# EAGLE library part OBD2-J1962 (library moto-core)
OBD2-J1962 SAE J1962 16-pin OBD2 konnektor (Honda DLC adaptor ucu / HIL dişi soket). Pin numaralari standart. Kart: 40.0 x 18.0 mm - Guven: H STEP: GrabCAD 'OBD2 J1962 female connector' NOT: CL250 DLC (4/6-pin) pinout'u hardware-integration §1'de CONFIRM; bu cihaz adaptorun 16-pin ucu.
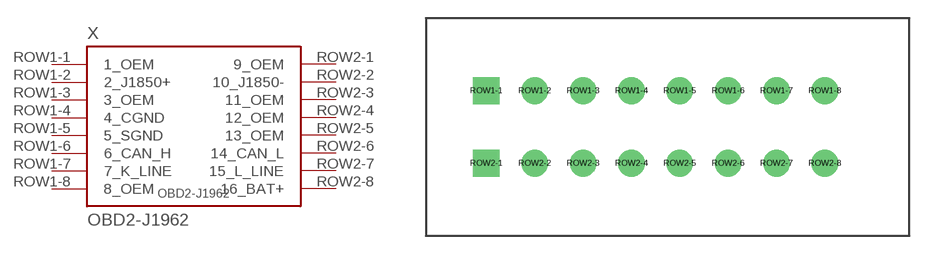
[diagram p6: symbol with the pads of OBD2-J1962; footprint OBD2-J1962]

Designator prefix X

## OBD2-J1962 (BOARD_SIZE: 40.0x18.0mm; CONFIDENCE: H)  [OBD2-J1962]
ROW1-1  1_OEM  pas
ROW1-2  2_J1850+  pas
ROW1-3  3_OEM  pas
ROW1-4  4_CGND  pas
ROW1-5  5_SGND  pas
ROW1-6  6_CAN_H  pas
ROW1-7  7_K_LINE  pas
ROW1-8  8_OEM  pas
ROW2-1  9_OEM  pas
ROW2-2  10_J1850-  pas
ROW2-3  11_OEM  pas
ROW2-4  12_OEM  pas
ROW2-5  13_OEM  pas
ROW2-6  14_CAN_L  pas
ROW2-7  15_L_LINE  pas
ROW2-8  16_BAT+  pas

## Footprint OBD2-J1962 (pad centres in mm)
SAE J1962 16-pin OBD2 konnektor (Honda DLC adaptor ucu / HIL dişi soket). Pin numaralari standart. | Kart: 40.0 x 18.0 mm | Guven: H
drill 1.2 pad 2.2 square: ROW1-1 -15,3; ROW2-1 -15,-3
drill 1.2 pad 2.2 round: ROW1-2 -11,3; ROW1-3 -7,3; ROW1-4 -3,3; ROW1-5 1,3; ROW1-6 5,3; ROW1-7 9,3; ROW1-8 13,3; ROW2-2 -11,-3; ROW2-3 -7,-3; ROW2-4 -3,-3; ROW2-5 1,-3; ROW2-6 5,-3; ROW2-7 9,-3; ROW2-8 13,-3